# Altium schematic symbol library PWR763A.SCHLIB: 55 symbols (part 1 of 2)
Pins are listed as number, name and electrical type; pins without a type are passive.

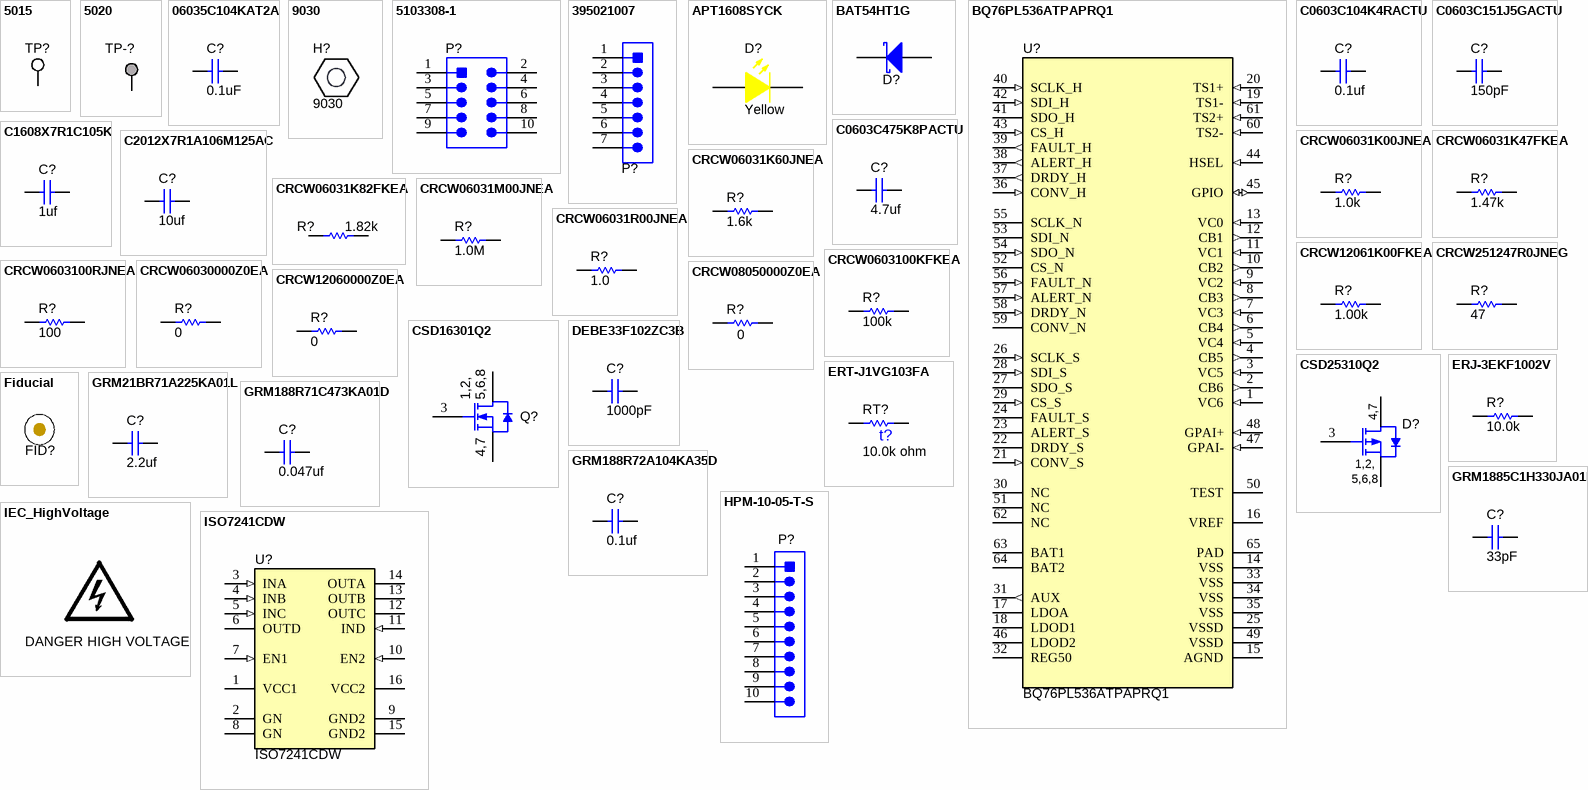
[diagram p0: symbols 5015 to ISO7241CDW]

## 5015
designator TP?  (value not drawn)
Test Point, Miniature, SMT; Manufacturer: Keystone; CompType: Test Point Loop; U/M: EA; SymbolVersion: 2008-07-10; PackageReference: Testpoint_Keystone_Miniature; Publisher: Texas Instruments; LatestRevisionDate: 2015-07-28; PartNumber: 5015; RoHS: Y; MountType: SMT; ComponentLink1Description: Datasheet Link; ComponentLink1URL: http://www.keyelco.com/userAssets/store/files/5015.PDF; Value: SMT; Supplier 1: Digi-Key; Supplier Part Number 1: 36-5015CT-ND
footprint Testpoint_Keystone_Miniature
pins: 1

## 5020
designator TP-?  (value not drawn)  (no BOM)
LOW PROFILE, TH; Manufacturer: Keystone; CompType: Standoff; SymbolVersion: 2010-10-20; PackageReference: LOW PROFILE, TH; Publisher: Texas Instruments; LatestRevisionDate: 2015-08-11; PartNumber: 5020; RoHS: Y; MountType: TH; ComponentLink1Description: Datasheet Link; ComponentLink1URL: http://keyelco.com/userAssets/file/M65p56.pdf; Supplier 1: Digi-Key; Supplier Part Number 1: 36-5020-ND; Supplier 2: Mouser; Supplier Part Number 2: 534-5020; Supplier 3: Farnell; Supplier Part Number 3: 1702264
footprint Keystone_5020
footprint Keystone_5025
footprint Keystone_5015
footprint Testpoint_Keystone_Miniature
pins: 1

## 06035C104KAT2A
designator C?  value 0.1uF  (hidden comment: 06035C104KAT2A)
CAP, CERM, 0.1uf, 50 V, +/- 10%, X7R, 0603; Manufacturer: AVX; Polarized: N; CompType: Capacitor; ValueDisplayed: 0.1µF; U/M: EA; Cap_F: 0.0000001; Tolerance_%: 10; Value1: Unknown; VDC_V: 50; Value2: 50V; TaMin_C: -55; TaMax_C: 125; Cap_Case: 0603; SymbolVersion: 2008-07-09; PartNumber: 06035C104KAT2A; PackageReference: 0603; RoHS: Y; MountType: SMT; Technology: Ceramic; TempCo: X7R; Published: 2008-06-19; Publisher: Texas Instruments; LatestRevisionDate: 2015-07-09; ComponentLink1Description: Datasheet link; ComponentLink1URL: http://www.avx.com/docs/Catalogs/cx7r.pdf; Supplier 1: Digi-Key; Supplier Part Number 1: 478-5052-1-ND; Supplier 2: Mouser; Supplier Part Number 2: 581-06035C104KAT2A; Supplier 3: Farnell; Supplier Part Number 3: 1301804
signal-integrity model Cap
simulation model Cap
footprint 0603
footprint 0603M
footprint 0603L
footprint 0603_HV
footprint 0603S
pins: 1, 2

## 9030
designator H?
BRD SPT SNAP LOCK SCREW MNT 3/8"; Manufacturer: Keystone; SymbolCreator: a0412235; CompType: Nylon Spacer; SymbolVersion: 2013-06-24; PartNumber: 9030; RoHS: Y; PackageReference: BRD SPT SNAP LOCK SCREW MNT 3/8"; MountType: TH; ComponentLink1Description: Datasheet Link; ComponentLink1URL: http://www.keyelco.com/userAssets/file/M60-2p77.pdf; Publisher: Texas Instruments; LatestRevisionDate: 2015-08-11; Supplier 1: Digi-Key; Supplier Part Number 1: 36-9030-ND; Supplier 2: Mouser; Supplier Part Number 2: 534-9030
footprint Keystone_9030

## 5103308-1
designator P?  (value not drawn)
Header (shrouded), 100mil, 5x2, Gold, TH; Manufacturer: TE Connectivity; SymbolCreator: a0412235; U/M: EA; SymbolVersion: 2013-12-22; PartNumber: 5103308-1; PackageReference: 5x2 Shrouded header; CompType: Header; RoHS: Y; MountType: TH; ComponentLink1Description: Datasheet Link; ComponentLink1URL: http://www.te.com/commerce/DocumentDelivery/DDEController?Action=showdoc&DocId=Customer+Drawing%7F5103308%7FE%7Fpdf%7FEnglish%7FENG_CD_5103308_E.pdf%7F5103308-1; Publisher: Texas Instruments; LatestRevisionDate: 2014-11-19; Supplier 1: Digi-Key; Supplier Part Number 1: A33159-ND; Supplier 2: Mouser; Supplier Part Number 2: 571-5103308-1; Supplier 3: Farnell; Supplier Part Number 3: 1772835
footprint CONN_5103308-1
pins: 1, 2, 3, 4, 5, 6, 7, 8, 9, 10

## 395021007
designator P?  (value not drawn)
Header(Shrouded), 3.5mm, 7x1,  R/A, TH; Manufacturer: Molex; SymbolCreator: a0411947; U/M: EA; SymbolVersion: 2013-12-22; PartNumber: 395021007; PackageReference: Header(Shrouded), 3.5mm, 7x1, R/A, TH; CompType: Header; RoHS: Y; MountType: TH; ComponentLink1Description: Datasheet Link; ComponentLink1URL: http://www.molex.com/pdm_docs/sd/395021002_sd.pdf; Publisher: Texas Instruments; LatestRevisionDate: 2015-06-30; Supplier 1: Digi-Key; Supplier Part Number 1: WM7775-ND; Supplier 2: Mouser; Supplier Part Number 2: 538-39502-1007
footprint Molex_395021007
pins: 1, 2, 3, 4, 5, 6, 7

## APT1608SYCK
designator D?  value Yellow  (hidden comment: APT1608SYCK)
LED, Yellow, SMD; Manufacturer: Kingbright; SymbolCreator: Altium; Vf_V: 2.5; Value2: 2.5V; Io_A: 0.02; Vr_V: 5; Ir_A: 1e-005; Tjmax_C: 85; Value1: W; Angle: 120; U/M: EA; SymbolVersion: 2015-06-04; PartNumber: APT1608SYCK; PackageReference: 0603(1608); RoHS: Y; CompType: LED; Type: ?; MountType: SMT; Color: yellow; Published: 2008-07-11; Publisher: Texas Instruments; ComponentLink1URL: http://www.kingbrightusa.com/images/catalog/SPEC/APT1608SYCK.pdf; ComponentLink1Description: Datasheet link; LatestRevisionDate: 2015-06-25; Supplier 1: Digi-Key; Supplier Part Number 1: 754-1124-1-ND; Supplier 2: Mouser; Supplier Part Number 2: 604-APT1608SYCK
footprint APT1608_Yellow
pins: 1 A, 2 K

## BAT54HT1G
designator D?  (value not drawn)
Diode, Schottky, 30 V, 0.2 A, SOD-323; Manufacturer: ON Semiconductor; U/M: EA; Vf_V: 0.35; Value: 30V; Value1: 0.2A; Value2: 0.35V; Io_A: 0.2; Vr_V: 30; CompType: Diode; SymbolVersion: 2008-12-08; PartNumber: BAT54HT1G; PackageReference: SOD-323; MountType: SMT; Type: Schottky; Published: 2008-06-26; Publisher: Texas Instruments; LatestRevisionDate: 2015-07-08; ComponentLink1Description: Datasheet link; ComponentLink1URL: http://www.onsemi.com/pub/Collateral/BAT54HT1-D.PDF; Supplier 1: Digi-Key; Supplier Part Number 1: BAT54HT1OSCT-ND; Supplier 2: Mouser; Supplier Part Number 2: 863-BAT54HT1G; Supplier 3: Farnell; Supplier Part Number 3: 1459033
signal-integrity model Diode
footprint sod-323
pins: 1 K, 2 A

## BQ76PL536ATPAPRQ1
designator U?
3 to 6 Series Cell Lithium-Ion Battery Monitor and Secondary Protection IC for EV and HEV Application, PAP0064F; Alternate PartNumber: BQ76PL536ATPAPTQ1; Manufacturer: Texas Instruments; SymbolCreator: Altium; U/M: EA; SymbolVersion: 2015-11-04; PartNumber: BQ76PL536ATPAPRQ1; PackageReference: PAP0064F; MountType: SMT; ComponentLink1Description: Datasheet Link; ComponentLink1URL: http://www.ti.com/lit/ds/symlink/bq76pl536a.pdf; CompType: IC; RoHS: Y; Publisher: Texas Instruments; LatestRevisionDate: 2015-11-04; Alternate Manufacturer: Texas Instruments
footprint PAP0064F_N
footprint PAP0064F_M
footprint PAP0064F_L
pins: 1 VC6 (in), 2 CB6 (out), 3 VC5 (in), 4 CB5 (out), 5 VC4 (in), 6 CB4 (out), 7 VC3 (in), 8 CB3 (out), 9 VC2 (in), 10 CB2 (out), 11 VC1 (in), 12 CB1 (out), 13 VC0 (in), 14 VSS (power), 15 AGND (power), 16 VREF, 17 LDOA (power), 18 LDOD1 (power), 19 TS1- (in), 20 TS1+ (in), 21 CONV_S (in), 22 DRDY_S (oc), 23 ALERT_S (oc), 24 FAULT_S (oc), 25 VSSD (power), 26 SCLK_S (in), 27 SDO_S (oc), 28 SDI_S (in), 29 CS_S (in), 30 NC, 31 AUX (out), 32 REG50 (power), 33 VSS (power), 34 VSS (power), 35 VSS (power), 36 CONV_H (in), 37 DRDY_H (out), 38 ALERT_H (out), 39 FAULT_H (out), 40 SCLK_H (in), 41 SDO_H (hiz), 42 SDI_H (in), 43 CS_H (in), 44 HSEL (in), 45 GPIO (io), 46 LDOD2 (power), 47 GPAI- (in), 48 GPAI+ (in), 49 VSSD (power), 50 TEST, 51 NC, 52 CS_N (oc), 53 SDI_N (oc), 54 SDO_N (in), 55 SCLK_N (oc), 56 FAULT_N (in), 57 ALERT_N (in), 58 DRDY_N (in), 59 CONV_N (oc), 60 TS2- (in), 61 TS2+ (in), 62 NC, 63 BAT1 (power), 64 BAT2 (power), 65 PAD (power)

## C0603C104K4RACTU
designator C?  ValueDisplayed: 0.1uf  (hidden comment: C0603C104K4RACTU)
CAP, CERM, 0.1uf, 16 V, +/- 10%, X7R, 0603; Manufacturer: Kemet; Polarized: N; CompType: Capacitor; U/M: EA; Cap_F: 0.0000001; Tolerance_%: 10; Value1: Unknown; VDC_V: 16; Value2: 16V; TaMin_C: -55; TaMax_C: 125; Cap_Case: 0603; SymbolVersion: 2008-07-09; Value: 0.1uF; PartNumber: C0603C104K4RACTU; PackageReference: 0603; RoHS: Y; MountType: SMT; Technology: Ceramic; TempCo: X7R; Published: 2008-06-19; Publisher: Texas Instruments; LatestRevisionDate: 2015-07-09; ComponentLink1Description: Datasheet link; ComponentLink1URL: http://www.kemet.com/kemet/web/homepage/kechome.nsf/vapubfiles/F3102_Y5V.pdf/$file/F3102_Y5V.pdf; Supplier 1: Digi-Key; Supplier Part Number 1: 399-1096-1-ND; Supplier 2: Mouser; Supplier Part Number 2: 80-C0603C104K4R; Supplier 3: Farnell; Supplier Part Number 3: 1414610
signal-integrity model Cap
simulation model Cap
footprint 0603
footprint 0603M
footprint 0603L
footprint 0603_HV
footprint 0603S
pins: 1, 2

## C0603C151J5GACTU
designator C?  ValueDisplayed: 150pF  (hidden comment: C0603C151J5GACTU)
CAP, CERM, 150 pF, 50 V, +/- 5%, C0G/NP0, 0603; Manufacturer: Kemet; Polarized: N; CompType: Capacitor; Value: 150pF; U/M: EA; Cap_F: 0.00000000015; Tolerance_%: 5; Value1: Unknown; VDC_V: 50; Value2: 50V; TaMin_C: -55; TaMax_C: 125; Cap_Case: 0603; SymbolVersion: 2008-07-09; PartNumber: C0603C151J5GACTU; PackageReference: 0603; RoHS: Y; MountType: SMT; Technology: Ceramic; TempCo: C0G/NP0; Published: 2008-06-19; Publisher: Texas Instruments; LatestRevisionDate: 2015-07-09; ComponentLink1Description: Datasheet link; ComponentLink1URL: http://www.kemet.com/kemet/web/homepage/kechome.nsf/vapubfiles/F3102_Y5V.pdf/$file/F3102_Y5V.pdf; Supplier 1: Digi-Key; Supplier Part Number 1: 399-1063-1-ND; Supplier 2: Mouser; Supplier Part Number 2: 80-C0603C151J5G; Supplier 3: Farnell; Supplier Part Number 3: 1414615
signal-integrity model Cap
simulation model Cap
footprint 0603
footprint 0603M
footprint 0603L
footprint 0603_HV
footprint 0603S
pins: 1, 2

## C0603C475K8PACTU
designator C?  ValueDisplayed: 4.7uf  (hidden comment: C0603C475K8PACTU)
CAP, CERM, 4.7uf, 10 V, +/- 10%, X5R, 0603; Manufacturer: Kemet; Polarized: N; CompType: Capacitor; U/M: EA; Cap_F: 0.0000047; Tolerance_%: 10; ESR_ohm: 0.006; Value1: 0.006 ohm; Value2: 10V; IRMS_A: 7.24; TaMin_C: -55; TaMax_C: 85; Cap_Case: 0603; SymbolVersion: 2008-07-09; Value: 4.7uF; PartNumber: C0603C475K8PACTU; PackageReference: 0603; RoHS: Y; VDC_V: 10; MountType: SMT; Technology: Ceramic; TempCo: X5R; Published: 2008-06-19; Publisher: Texas Instruments; LatestRevisionDate: 2015-07-09; ComponentLink1Description: Datasheet link; ComponentLink1URL: http://www.kemet.com/kemet/web/homepage/kechome.nsf/vapubfiles/F3102_Y5V.pdf/$file/F3102_Y5V.pdf; Supplier 1: Digi-Key; Supplier Part Number 1: 399-5503-1-ND; Supplier 2: Mouser; Supplier Part Number 2: 80-C0603C475K8P; Supplier 3: Farnell; Supplier Part Number 3: 1572625
signal-integrity model Cap
simulation model Cap
footprint 0603
footprint 0603M
footprint 0603L
footprint 0603_HV
footprint 0603S
pins: 1, 2

## C1608X7R1C105K
designator C?  ValueDisplayed: 1uf  (hidden comment: C1608X7R1C105K)
CAP, CERM, 1uf, 16 V, +/- 10%, X7R, 0603; Manufacturer: TDK; Polarized: N; CompType: Capacitor; U/M: EA; Cap_F: 0.000001; Tolerance_%: 10; ESR_ohm: 0.0057; Value1: 0.0057 ohm; VDC_V: 16; Value2: 16V; TaMin_C: -55; TaMax_C: 125; Cap_Case: 0603; SymbolVersion: 2008-07-09; Value: 1uF; PartNumber: C1608X7R1C105K; PackageReference: 0603; RoHS: Y; MountType: SMT; Technology: Ceramic; TempCo: X7R; Published: 2008-06-19; Publisher: Texas Instruments; LatestRevisionDate: 2015-07-09; ComponentLink1Description: Datasheet link; ComponentLink1URL: http://www.tdk.co.jp/tefe02/e412_c.pdf; Supplier 1: Digi-Key; Supplier Part Number 1: 445-1604-1-ND; Supplier 2: Farnell; Supplier Part Number 2: 1907343
signal-integrity model Cap
simulation model Cap
footprint 0603
footprint 0603M
footprint 0603L
footprint 0603_HV
footprint 0603S
pins: 1, 2

## C2012X7R1A106M125AC
designator C?  ValueDisplayed: 10uf  (hidden comment: C2012X7R1A106M125AC)
CAP, CERM, 10uf, 10 V, +/- 20%, X7R, 0805; Manufacturer: TDK; Polarized: N; CompType: Capacitor; U/M: EA; Cap_F: 0.00001; Tolerance_%: 20; Value1: Unknown; VDC_V: 10; Value2: 10V; TaMin_C: -55; TaMax_C: 125; Cap_Case: 0805; SymbolVersion: 2008-07-09; Value: 10uF; PartNumber: C2012X7R1A106M125AC; PackageReference: 0805; RoHS: Y; MountType: SMT; Technology: Ceramic; TempCo: X7R; Published: 2008-06-19; Publisher: Texas Instruments; LatestRevisionDate: 2015-07-09; ComponentLink1Description: Datasheet link; ComponentLink1URL: http://product.tdk.com/capacitor/mlcc/en/documents/mlcc_commercial_general_en.pdf; Supplier 1: Digi-Key; Supplier Part Number 1: 445-7592-1-ND; Supplier 2: Mouser; Supplier Part Number 2: 810-C2012X7R1A106M; Supplier 3: Farnell; Supplier Part Number 3: 2354122
signal-integrity model Cap
simulation model Cap
footprint 0805_145
footprint 0805_145M
footprint 0805_145L
footprint 0805_145HV
pins: 1, 2

## CRCW06031K00JNEA
designator R?  ValueDisplayed: 1.0k  (hidden comment: CRCW06031K00JNEA)
RES, 1.0 k, 5%, 0.1 W, 0603; Manufacturer: Vishay-Dale; CompType: Resistor; Value: 1.0k; Res_ohm: 1000; Value_Code: 1k00; Tolerance_%: 5; Power_W: 0.1; Value2: 0.1W; VDC_V: 75; TempCo: 200 ppm/C; EIA_Code: E24; U/M: EA; SymbolVersion: 2009-05-29; PartNumber: CRCW06031K00JNEA; PackageReference: 0603; RoHS: Y; Value1: 5%; MountType: SMT; Technology: Thick Film; Published: 2008-06-26; Publisher: Texas Instruments; LatestRevisionDate: 2015-06-13; ComponentLink1Description: Datasheet link; ComponentLink1URL: http://www.vishay.com/docs/20035/dcrcwe3.pdf; Supplier 1: Digi-Key; Supplier Part Number 1: 541-1.0KGCT-ND; Supplier 2: Mouser; Supplier Part Number 2: 71-CRCW0603J-1.0K-E3; Supplier 3: Farnell; Supplier Part Number 3: 1652851
signal-integrity model Resistor
simulation model Resistor
footprint 0603
footprint 0603M
footprint 0603L
footprint 0603_HV
footprint 0603S
pins: 1, 2

## CRCW06031K47FKEA
designator R?  ValueDisplayed: 1.47k  (hidden comment: CRCW06031K47FKEA)
RES, 1.47 k, 1%, 0.1 W, 0603; Manufacturer: Vishay-Dale; CompType: Resistor; Value: 1.47k; Res_ohm: 1470; Value_Code: 1k47; Tolerance_%: 1; Power_W: 0.1; Value2: 0.1W; VDC_V: 75; TempCo: 100 ppm/C; EIA_Code: E96; U/M: EA; SymbolVersion: 2009-05-29; PartNumber: CRCW06031K47FKEA; PackageReference: 0603; RoHS: Y; Value1: 1%; MountType: SMT; Technology: Thick Film; Published: 2008-06-26; Publisher: Texas Instruments; LatestRevisionDate: 2015-06-13; ComponentLink1Description: Datasheet link; ComponentLink1URL: http://www.vishay.com/docs/20035/dcrcwe3.pdf; Supplier 1: Digi-Key; Supplier Part Number 1: 541-1.47KHCT-ND; Supplier 2: Mouser; Supplier Part Number 2: 71-CRCW0603-1.47K-E3; Supplier 3: Farnell; Supplier Part Number 3: 1563607
signal-integrity model Resistor
simulation model Resistor
footprint 0603
footprint 0603M
footprint 0603L
footprint 0603_HV
footprint 0603S
pins: 1, 2

## CRCW06031K60JNEA
designator R?  ValueDisplayed: 1.6k  (hidden comment: CRCW06031K60JNEA)
RES, 1.6 k, 5%, 0.1 W, 0603; Manufacturer: Vishay-Dale; CompType: Resistor; Value: 1.6k; Res_ohm: 1600; Value_Code: 1k60; Tolerance_%: 5; Power_W: 0.1; Value2: 0.1W; VDC_V: 75; TempCo: 200 ppm/C; EIA_Code: E24; U/M: EA; SymbolVersion: 2009-05-29; PartNumber: CRCW06031K60JNEA; PackageReference: 0603; RoHS: Y; Value1: 5%; MountType: SMT; Technology: Thick Film; Published: 2008-06-26; Publisher: Texas Instruments; LatestRevisionDate: 2015-06-13; ComponentLink1Description: Datasheet link; ComponentLink1URL: http://www.vishay.com/docs/20035/dcrcwe3.pdf; Supplier 1: Digi-Key; Supplier Part Number 1: 541-1.6KGCT-ND; Supplier 2: Mouser; Supplier Part Number 2: 71-CRCW0603J-1.6K-E3; Supplier 3: Farnell; Supplier Part Number 3: 1541949
signal-integrity model Resistor
simulation model Resistor
footprint 0603
footprint 0603M
footprint 0603L
footprint 0603_HV
footprint 0603S
pins: 1, 2

## CRCW06031K82FKEA
designator R?  ValueDisplayed: 1.82k  (hidden comment: CRCW06031K82FKEA)
RES, 1.82 k, 1%, 0.1 W, 0603; Manufacturer: Vishay-Dale; CompType: Resistor; Value: 1.82k; Res_ohm: 1820; Value_Code: 1k82; Tolerance_%: 1; Power_W: 0.1; Value2: 0.1W; VDC_V: 75; TempCo: 100 ppm/C; EIA_Code: E96; U/M: EA; SymbolVersion: 2009-05-29; PartNumber: CRCW06031K82FKEA; PackageReference: 0603; RoHS: Y; Value1: 1%; MountType: SMT; Technology: Thick Film; Published: 2008-06-26; Publisher: Texas Instruments; LatestRevisionDate: 2015-06-13; ComponentLink1Description: Datasheet link; ComponentLink1URL: http://www.vishay.com/docs/20035/dcrcwe3.pdf; Supplier 1: Digi-Key; Supplier Part Number 1: 541-1.82KHCT-ND; Supplier 2: Mouser; Supplier Part Number 2: 71-CRCW0603-1.82K-E3; Supplier 3: Farnell; Supplier Part Number 3: 1652855
signal-integrity model Resistor
simulation model Resistor
footprint 0603
footprint 0603M
footprint 0603L
footprint 0603_HV
footprint 0603S
pins: 1, 2

## CRCW06031M00JNEA
designator R?  ValueDisplayed: 1.0M  (hidden comment: CRCW06031M00JNEA)
RES, 1.0 M, 5%, 0.1 W, 0603; Manufacturer: Vishay-Dale; CompType: Resistor; Value: 1.0Meg; Res_ohm: 1000000; Value_Code: 1M00; Tolerance_%: 5; Power_W: 0.1; Value2: 0.1W; VDC_V: 75; TempCo: 200 ppm/C; EIA_Code: E24; U/M: EA; SymbolVersion: 2009-05-29; PartNumber: CRCW06031M00JNEA; PackageReference: 0603; RoHS: Y; Value1: 5%; MountType: SMT; Technology: Thick Film; Published: 2008-06-26; Publisher: Texas Instruments; LatestRevisionDate: 2015-06-13; ComponentLink1Description: Datasheet link; ComponentLink1URL: http://www.vishay.com/docs/20035/dcrcwe3.pdf; Supplier 1: Digi-Key; Supplier Part Number 1: 541-1.0MGCT-ND; Supplier 2: Mouser; Supplier Part Number 2: 71-CRCW0603J-1.0M-E3; Supplier 3: Farnell; Supplier Part Number 3: 1514706
signal-integrity model Resistor
simulation model Resistor
footprint 0603
footprint 0603M
footprint 0603L
footprint 0603_HV
footprint 0603S
pins: 1, 2

## CRCW06031R00JNEA
designator R?  ValueDisplayed: 1.0  (hidden comment: CRCW06031R00JNEA)
RES, 1.0, 5%, 0.1 W, 0603; Manufacturer: Vishay-Dale; CompType: Resistor; Value: 1.0; Res_ohm: 1; Value_Code: 1R00; Tolerance_%: 5; Power_W: 0.1; Value2: 0.1W; VDC_V: 75; TempCo: 200 ppm/C; EIA_Code: E24; U/M: EA; SymbolVersion: 2009-05-29; PartNumber: CRCW06031R00JNEA; PackageReference: 0603; RoHS: Y; Value1: 5%; MountType: SMT; Technology: Thick Film; Published: 2008-06-26; Publisher: Texas Instruments; LatestRevisionDate: 2015-06-13; ComponentLink1Description: Datasheet link; ComponentLink1URL: http://www.vishay.com/docs/20035/dcrcwe3.pdf; Supplier 1: Digi-Key; Supplier Part Number 1: 541-1.0GCT-ND; Supplier 2: Mouser; Supplier Part Number 2: 71-CRCW0603J-1-E3; Supplier 3: Farnell; Supplier Part Number 3: 1514709
signal-integrity model Resistor
simulation model Resistor
footprint 0603
footprint 0603M
footprint 0603L
footprint 0603_HV
footprint 0603S
pins: 1, 2

## CRCW12061K00FKEA
designator R?  value 1.00k  (hidden comment: CRCW12061K00FKEA)
RES, 1.00 k, 1%, 0.25 W, 1206; Manufacturer: Vishay-Dale; CompType: Resistor; Res_ohm: 1000; Value_Code: 1k00; Tolerance_%: 1; Power_W: 0.25; Value2: 0.25W; VDC_V: 200; TempCo: 100 ppm/C; EIA_Code: E96; U/M: EA; SymbolVersion: 2009-05-29; PartNumber: CRCW12061K00FKEA; PackageReference: 1206; RoHS: Y; Value1: 1%; MountType: SMT; Technology: Thick Film; Published: 2008-06-26; Publisher: Texas Instruments; LatestRevisionDate: 2015-06-11; ComponentLink1Description: Datasheet link; ComponentLink1URL: http://www.vishay.com/docs/20035/dcrcwe3.pdf; Supplier 1: Digi-Key; Supplier Part Number 1: 541-1.00KFCT-ND; Supplier 2: Mouser; Supplier Part Number 2: 71-CRCW1206-1.0K-E3; Supplier 3: Farnell; Supplier Part Number 3: 1469965; ValueDisplayed: 1.00k
signal-integrity model Resistor
simulation model Resistor
footprint 1206
footprint 1206M
footprint 1206L
pins: 1, 2

## CRCW251247R0JNEG
designator R?  ValueDisplayed: 47  (hidden comment: CRCW251247R0JNEG)
RES, 47, 5%, 1 W, 2512; Manufacturer: Vishay-Dale; CompType: Resistor; Value: 47; Value_Code: 47R0; Tolerance_%: 5; Power_W: 1; Value2: 1W; VDC_V: 500; TempCo: 200 ppm/C; EIA_Code: E24; U/M: EA; SymbolVersion: 2009-05-29; PartNumber: CRCW251247R0JNEG; PackageReference: 2512; RoHS: Y; Res_ohm: 47; Value1: 5%; MountType: SMT; Technology: Thick Film; Published: 2008-06-26; Publisher: Texas Instruments; LatestRevisionDate: 2015-04-21; ComponentLink1Description: Datasheet link; ComponentLink1URL: http://www.vishay.com/doc?20035; Supplier 1: Digi-Key; Supplier Part Number 1: 541-47XCT-ND
signal-integrity model Resistor
simulation model Resistor
footprint 2512
footprint 2512M
footprint 2512L
footprint R2512
pins: 1, 2

## CRCW0603100KFKEA
designator R?  ValueDisplayed: 100k  (hidden comment: CRCW0603100KFKEA)
RES, 100 k, 1%, 0.1 W, 0603; Manufacturer: Vishay-Dale; CompType: Resistor; Value: 100k; Res_ohm: 100000; Tolerance_%: 1; Power_W: 0.1; Value2: 0.1W; VDC_V: 75; TempCo: 100 ppm/C; EIA_Code: E96; U/M: EA; SymbolVersion: 2009-05-29; PartNumber: CRCW0603100KFKEA; PackageReference: 0603; RoHS: Y; Value_Code: 100k; Value1: 1%; MountType: SMT; Technology: Thick Film; Published: 2008-06-26; Publisher: Texas Instruments; LatestRevisionDate: 2015-06-13; ComponentLink1Description: Datasheet link; ComponentLink1URL: http://www.vishay.com/docs/20035/dcrcwe3.pdf; Supplier 1: Digi-Key; Supplier Part Number 1: 541-100KHCT-ND; Supplier 2: Mouser; Supplier Part Number 2: 71-CRCW0603-100K-E3; Supplier 3: Farnell; Supplier Part Number 3: 1469649
signal-integrity model Resistor
simulation model Resistor
footprint 0603
footprint 0603M
footprint 0603L
footprint 0603_HV
footprint 0603S
pins: 1, 2

## CRCW0603100RJNEA
designator R?  ValueDisplayed: 100  (hidden comment: CRCW0603100RJNEA)
RES, 100, 5%, 0.1 W, 0603; Manufacturer: Vishay-Dale; CompType: Resistor; Value: 100; Value_Code: 100R; Tolerance_%: 5; Power_W: 0.1; Value2: 0.1W; VDC_V: 75; TempCo: 200 ppm/C; EIA_Code: E24; U/M: EA; SymbolVersion: 2009-05-29; PartNumber: CRCW0603100RJNEA; PackageReference: 0603; RoHS: Y; Res_ohm: 100; Value1: 5%; MountType: SMT; Technology: Thick Film; Published: 2008-06-26; Publisher: Texas Instruments; LatestRevisionDate: 2015-06-13; ComponentLink1Description: Datasheet link; ComponentLink1URL: http://www.vishay.com/docs/20035/dcrcwe3.pdf; Supplier 1: Digi-Key; Supplier Part Number 1: 541-100GCT-ND; Supplier 2: Mouser; Supplier Part Number 2: 71-CRCW0603J-100-E3; Supplier 3: Farnell; Supplier Part Number 3: 1514715
signal-integrity model Resistor
simulation model Resistor
footprint 0603
footprint 0603M
footprint 0603L
footprint 0603_HV
footprint 0603S
pins: 1, 2

## CRCW06030000Z0EA
designator R?  ValueDisplayed: 0  (hidden comment: CRCW06030000Z0EA)
RES, 0, 5%, 0.1 W, 0603; Manufacturer: Vishay-Dale; CompType: Resistor; Value: 0; Value_Code: 0000; Tolerance_%: 5; Power_W: 0.1; Value2: 0.1W; VDC_V: 75; TempCo: 200 ppm/C; EIA_Code: E24; U/M: EA; SymbolVersion: 2009-05-29; PartNumber: CRCW06030000Z0EA; PackageReference: 0603; RoHS: Y; Res_ohm: 0; Value1: 5%; MountType: SMT; Technology: Thick Film; Published: 2008-06-26; Publisher: Texas Instruments; LatestRevisionDate: 2015-06-13; ComponentLink1Description: Datasheet link; ComponentLink1URL: http://www.vishay.com/docs/20035/dcrcwe3.pdf; Supplier 1: Digi-Key; Supplier Part Number 1: 541-0.0GCT-ND; Supplier 2: Mouser; Supplier Part Number 2: 71-CRCW0603-0-E3; Supplier 3: Farnell; Supplier Part Number 3: 1469739
signal-integrity model Resistor
simulation model Resistor
footprint 0603
footprint 0603M
footprint 0603L
footprint 0603_HV
footprint 0603S
pins: 1, 2

## CRCW08050000Z0EA
designator R?  ValueDisplayed: 0  (hidden comment: CRCW08050000Z0EA)
RES, 0, 5%, 0.125 W, 0805; Manufacturer: Vishay-Dale; CompType: Resistor; Value: 0; Value_Code: 0000; Tolerance_%: 5; Power_W: 0.125; Value2: 0.125W; VDC_V: 150; TempCo: 200 ppm/C; EIA_Code: E24; U/M: EA; SymbolVersion: 2009-05-29; PartNumber: CRCW08050000Z0EA; PackageReference: 0805; RoHS: Y; Res_ohm: 0; Value1: 5%; MountType: SMT; Technology: Thick Film; Published: 2008-06-26; Publisher: Texas Instruments; LatestRevisionDate: 2015-07-07; ComponentLink1Description: Datasheet link; ComponentLink1URL: http://www.vishay.com/docs/20035/dcrcwe3.pdf; Supplier 1: Digi-Key; Supplier Part Number 1: 541-0.0ACT-ND; Supplier 2: Mouser; Supplier Part Number 2: 71-CRCW0805-0-E3; Supplier 3: Farnell; Supplier Part Number 3: 1469846
signal-integrity model Resistor
simulation model Resistor
footprint 0805_HV
footprint 0805_HV1
footprint 0805
footprint 0805M
pins: 1, 2

## CRCW12060000Z0EA
designator R?  ValueDisplayed: 0  (hidden comment: CRCW12060000Z0EA)
RES, 0, 5%, 0.25 W, 1206; Manufacturer: Vishay-Dale; CompType: Resistor; Value: 0; Value_Code: 0000; Tolerance_%: 5; Power_W: 0.25; Value2: 0.25W; VDC_V: 200; TempCo: 200 ppm/C; EIA_Code: E24; U/M: EA; SymbolVersion: 2009-05-29; PartNumber: CRCW12060000Z0EA; PackageReference: 1206; RoHS: Y; Res_ohm: 0; Value1: 5%; MountType: SMT; Technology: Thick Film; Published: 2008-06-26; Publisher: Texas Instruments; LatestRevisionDate: 2015-06-11; ComponentLink1Description: Datasheet link; ComponentLink1URL: http://www.vishay.com/docs/20035/dcrcwe3.pdf; Supplier 1: Digi-Key; Supplier Part Number 1: 541-0.0ECT-ND; Supplier 2: Mouser; Supplier Part Number 2: 71-CRCW1206-0-E3; Supplier 3: Farnell; Supplier Part Number 3: 1469963
signal-integrity model Resistor
simulation model Resistor
footprint 1206
footprint 1206M
footprint 1206L
pins: 1, 2

## CSD16301Q2
designator Q?  (value not drawn)
MOSFET, N-CH, 25 V, 5 A, SON 2x2mm; Manufacturer: Texas Instruments; Alternate Manufacturer: None; U/M: EA; ChType: N; Value: 25V; VdsMax_V: 25; Value1: 0.023 ohm; Rdson45_ohm: 0.023; Value2: 2 nC; QgTyp_nC: 2; Vgs_V: 10; IdsMax_A: 5; SymbolVersion: 2011-11-14; CompType: MOSFET; PartNumber: CSD16301Q2; PackageReference: SON 2x2mm; RoHS: Y; MountType: SMT; Published: 2008-06-19; Publisher: Texas Instruments; LatestRevisionDate: 2015-08-03; LatestRevisionNote: Added parts.; ComponentLink1Description: Datasheet link; ComponentLink1URL: http://www.ti.com/lit/ds/symlink/csd16301q2.pdf; Supplier 1: Digi-Key; Supplier Part Number 1: 296-25260-1-ND; Supplier 2: Mouser; Supplier Part Number 2: 595-CSD16301Q2; Supplier 3: Farnell; Supplier Part Number 3: 1854243
footprint TRANS_NexFET_Q2
simulation model CSD16301Q2A
pins: 1 D, 2 D, 3 G, 4 S, 5 D, 6 D, 7 S, 8 D
text: 1,2,; 5,6,8; 4,7

## CSD25310Q2
designator D?  (value not drawn)
MOSFET, P-CH, -20 V, -20 A, SON 2x2mm; Manufacturer: Texas Instruments; Alternate Manufacturer: None; SymbolCreator: a0411947; U/M: EA; ChType: P; Value: -20V; Value1: 0.0239 ohm; Rdson45_ohm: 0.0239; Value2: 3.6 nC; QgTyp_nC: 3.6; Vgs_V: 8; AEC Category: Q101; SymbolVersion: 2013-04-04; PartNumber: CSD25310Q2; PackageReference: SON 2x2mm; CompType: MOSFET; VdsMax_V: -20; IdsMax_A: -20; RoHS: Y; MountType: SMT; Published: 2008-06-19; Publisher: Texas Instruments; LatestRevisionDate: 2015-08-18; LatestRevisionNote: Added parts.; ComponentLink1Description: Datasheet link; ComponentLink1URL: http://www.ti.com/lit/ds/symlink/csd25310q2.pdf; Supplier 1: Digi-Key; Supplier Part Number 1: CSD25310Q2-ND; Supplier 2: Mouser; Supplier Part Number 2: 595-CSD25310Q2; AEC Qualified: ?
footprint TRANS_NexFET_Q2
pins: 1 S, 2 S, 3 G, 4 D, 5 S, 6 S, 7 D, 8 S
text: 4,7; 1,2,; 5,6,8

## DEBE33F102ZC3B
designator C?  ValueDisplayed: 1000pF  (hidden comment: DEBE33F102ZC3B)
CAP, CERM, 1000 pF, 3150 V, +80/-20%, E, Radial Disc D7x6mm; Manufacturer: MuRata; Polarized: N; CompType: Capacitor; Value: 1000pF; U/M: EA; Cap_F: 0.000000001; Tolerance_%: 80; Value1: Unknown; VDC_V: 3150; Value2: 3150V; TaMin_C: -25; TaMax_C: 85; Cap_Case: Disc, 7x6mm; SymbolVersion: 2008-07-09; PartNumber: DEBE33F102ZC3B; PackageReference: Radial Disc D7x6mm; RoHS: Y; MountType: TH; Technology: Ceramic; TempCo: E; Published: 2008-06-19; Publisher: Texas Instruments; LatestRevisionDate: 2015-07-09; ComponentLink1Description: Datasheet link; ComponentLink1URL: http://www.murata.com/products/catalog/pdf/c85e.pdf; Supplier 1: Digi-Key; Supplier Part Number 1: 490-4247-ND; Supplier 2: Mouser; Supplier Part Number 2: 81-DEBE33F102ZC3B; Supplier 3: Farnell; Supplier Part Number 3: 9527192
signal-integrity model Cap
simulation model Cap
footprint CAPRD750W60D700H1000
pins: 1, 2

## ERJ-3EKF1002V
designator R?  ValueDisplayed: 10.0k  (hidden comment: ERJ-3EKF1002V)
RES, 10.0 k, 1%, 0.1 W, 0603; Manufacturer: Panasonic; CompType: Resistor; Value: 10.0k; Res_ohm: 10000; Value_Code: 10k0; Tolerance_%: 1; Power_W: 0.1; Value2: 0.1W; VDC_V: 75; TempCo: 100 ppm/C; EIA_Code: E96; U/M: EA; SymbolVersion: 2009-05-29; PartNumber: ERJ-3EKF1002V; PackageReference: 0603; RoHS: Y; Value1: 1%; MountType: SMT; Technology: Thick Film; Published: 2008-06-26; Publisher: Texas Instruments; LatestRevisionDate: 2015-06-13; ComponentLink1Description: Datasheet link; ComponentLink1URL: http://industrial.panasonic.com/www-data/pdf/AOA0000/AOA0000CE2.pdf; Supplier 1: Digi-Key; Supplier Part Number 1: P10.0KHCT-ND; Supplier 2: Mouser; Supplier Part Number 2: 667-ERJ-3EKF1002V; Supplier 3: Farnell; Supplier Part Number 3: 2397737
signal-integrity model Resistor
simulation model Resistor
footprint 0603
footprint 0603M
footprint 0603L
footprint 0603_HV
footprint 0603S
pins: 1, 2

## ERT-J1VG103FA
designator RT?  value 10.0k ohm  (hidden comment: ERT-J1VG103FA)
Thermistor NTC, 10.0k ohm, 1%, 0603; Manufacturer: Panasonic; Tolerance_%: 1; Power_W: 0.1; TaMin_C: -40; TaMax_C: 125; U/M: EA; CompType: ThermistorNTC; SymbolVersion: 2008-11-25; PartNumber: ERT-J1VG103FA; Series: ERT-J; PackageReference: 0603; MountType: SMT; RoHS: Y; ComponentLink1Description: Datasheet link; ComponentLink1URL: http://industrial.panasonic.com/www-data/pdf/AUA0000/AUA0000CE1.pdf; Published: 2009-09-22; Publisher: Texas Instruments; LatestRevisionDate: 2015-06-10; Supplier 1: Digi-Key; Supplier Part Number 1: P12011CT-ND
footprint 0603
footprint 0603M
footprint 0603L
footprint 0603_HV
footprint 0603S
pins: 1, 2
text: t?

## Fiducial
designator FID?  (value not drawn)
Fiducial mark.  There is nothing to buy or mount.; SymbolCreator: codlsc; SymbolVersion: 2009-11-4; CompType: Fiducial; Publisher: Texas Instruments; LatestRevisionDate: 2014-08-01; LatestRevisionNote: Added Alternate PartNumber and Alternate Manufacturer parameters to appropriate components.; Manufacturer: N/A; MountType: N/A; PackageReference: Fiducial; PartNumber: N/A; ClassName: FiducialMark
footprint Fiducial10-30
footprint Fiducial10-20
footprint Fiducial15-30
footprint Fiducial20-40
footprint Fiducial6.4-20

## GRM21BR71A225KA01L
designator C?  ValueDisplayed: 2.2uf  (hidden comment: GRM21BR71A225KA01L)
CAP, CERM, 2.2uf, 10 V, +/- 10%, X7R, 0805; Manufacturer: MuRata; Polarized: N; CompType: Capacitor; U/M: EA; Cap_F: 0.0000022; Tolerance_%: 10; ESR_ohm: 0.006; Value1: 0.006 ohm; Value2: 10V; TaMin_C: -55; TaMax_C: 125; Cap_Case: 0805; SymbolVersion: 2008-07-09; Value: 2.2uF; PartNumber: GRM21BR71A225KA01L; PackageReference: 0805; RoHS: Y; VDC_V: 10; MountType: SMT; Technology: Ceramic; TempCo: X7R; Published: 2008-06-19; Publisher: Texas Instruments; LatestRevisionDate: 2015-07-09; ComponentLink1Description: Datasheet link; ComponentLink1URL: http://search.murata.co.jp/Ceramy/PnsearchViewAction.do?HnOFG=ON&HnNFG=ON&SEL_CNT=50&sLang=en&sKey=GRM21BR71A225KA01L&x=9&y=9&search=startwith; Supplier 1: Digi-Key; Supplier Part Number 1: 490-1696-1-ND; Supplier 2: Mouser; Supplier Part Number 2: 81-GRM21BR71A225KA01; Supplier 3: Farnell; Supplier Part Number 3: 1828923
signal-integrity model Cap
simulation model Cap
footprint 0805_HV
footprint 0805_HV1
footprint 0805
footprint 0805M
footprint 0805L
pins: 1, 2

## GRM188R71C473KA01D
designator C?  ValueDisplayed: 0.047uf  (hidden comment: GRM188R71C473KA01D)
CAP, CERM, 0.047uf, 16 V, +/- 10%, X7R, 0603; Manufacturer: MuRata; Polarized: N; CompType: Capacitor; U/M: EA; Cap_F: 0.000000047; Tolerance_%: 10; Value1: Unknown; VDC_V: 16; Value2: 16V; TaMin_C: -55; TaMax_C: 125; Cap_Case: 0603; SymbolVersion: 2008-07-09; Value: 0.047uF; PartNumber: GRM188R71C473KA01D; PackageReference: 0603; RoHS: Y; MountType: SMT; Technology: Ceramic; TempCo: X7R; Published: 2008-06-19; Publisher: Texas Instruments; LatestRevisionDate: 2015-07-09; ComponentLink1Description: Datasheet link; ComponentLink1URL: http://search.murata.co.jp/Ceramy/PnsearchViewAction.do?HnOFG=ON&HnNFG=ON&SEL_CNT=50&sLang=en&sKey=GRM188R71C473KA01D&x=9&y=9&search=startwith; Supplier 1: Digi-Key; Supplier Part Number 1: 490-1529-1-ND; Supplier 2: Mouser; Supplier Part Number 2: 81-GRM39X473K16D
signal-integrity model Cap
simulation model Cap
footprint 0603
footprint 0603M
footprint 0603L
footprint 0603_HV
footprint 0603S
pins: 1, 2

## GRM188R72A104KA35D
designator C?  ValueDisplayed: 0.1uf  (hidden comment: GRM188R72A104KA35D)
CAP, CERM, 0.1uf, 100 V, +/- 10%, X7R, 0603; Manufacturer: MuRata; Polarized: N; CompType: Capacitor; U/M: EA; Cap_F: 0.0000001; Tolerance_%: 10; Value1: Unknown; VDC_V: 100; Value2: 100V; TaMin_C: -55; TaMax_C: 125; Cap_Case: 0603; SymbolVersion: 2008-07-09; Value: 0.1uF; PartNumber: GRM188R72A104KA35D; PackageReference: 0603; RoHS: Y; MountType: SMT; Technology: Ceramic; TempCo: X7R; Published: 2008-06-19; Publisher: Texas Instruments; LatestRevisionDate: 2015-07-09; ComponentLink1Description: Datasheet link; ComponentLink1URL: http://search.murata.co.jp/Ceramy/PnsearchViewAction.do?HnOFG=ON&HnNFG=ON&SEL_CNT=50&sLang=en&sKey=GRM188R72A104KA35D&x=9&y=9&search=startwith; Supplier 1: Digi-Key; Supplier Part Number 1: 490-3285-1-ND; Supplier 2: Mouser; Supplier Part Number 2: 81-GRM188R72A104KA35; Supplier 3: Farnell; Supplier Part Number 3: 1828921
signal-integrity model Cap
simulation model Cap
footprint 0603
footprint 0603M
footprint 0603L
footprint 0603_HV
footprint 0603S
pins: 1, 2

## GRM1885C1H330JA01D
designator C?  ValueDisplayed: 33pF  (hidden comment: GRM1885C1H330JA01D)
CAP, CERM, 33 pF, 50 V, +/- 5%, C0G/NP0, 0603; Manufacturer: MuRata; Polarized: N; CompType: Capacitor; Value: 33pF; U/M: EA; Cap_F: 0.000000000033; Tolerance_%: 5; Value1: Unknown; VDC_V: 50; Value2: 50V; TaMin_C: -55; TaMax_C: 125; Cap_Case: 0603; SymbolVersion: 2008-07-09; PartNumber: GRM1885C1H330JA01D; PackageReference: 0603; RoHS: Y; MountType: SMT; Technology: Ceramic; TempCo: C0G/NP0; Published: 2008-06-19; Publisher: Texas Instruments; LatestRevisionDate: 2015-07-09; ComponentLink1Description: Datasheet link; ComponentLink1URL: http://search.murata.co.jp/Ceramy/PnsearchViewAction.do?HnOFG=ON&HnNFG=ON&SEL_CNT=50&sLang=en&sKey=GRM1885C1H330JA01D&x=9&y=9&search=startwith; Supplier 1: Digi-Key; Supplier Part Number 1: 490-1415-1-ND; Supplier 2: Mouser; Supplier Part Number 2: 81-GRM39C330J50; Supplier 3: Farnell; Supplier Part Number 3: 1828910
signal-integrity model Cap
simulation model Cap
footprint 0603
footprint 0603M
footprint 0603L
footprint 0603_HV
footprint 0603S
pins: 1, 2

## HPM-10-05-T-S
designator P?  (value not drawn)
Header, 5.08mm, 10x1, Tin, TH; Manufacturer: Samtec; SymbolCreator: a0412235; U/M: EA; SymbolVersion: 2013-12-22; PartNumber: HPM-10-05-T-S; PackageReference: Header, 5.08mm, 10x1, TH; ClassName: Header; CompType: Header; RoHS: Y; MountType: TH; ComponentLink1Description: Datasheet Link; ComponentLink1URL: https://www.samtec.com/ftppub/pdf/HPM.PDF; Publisher: Texas Instruments; LatestRevisionDate: 2015-08-24; Supplier 1: Digi-Key; Supplier Part Number 1: HPM-10-05-T-S-ND
footprint Samtec_HPM-10-05-T-S
pins: 1, 2, 3, 4, 5, 6, 7, 8, 9, 10

## IEC_HighVoltage
designator CAUTION ?, comment DANGER HIGH VOLTAGE  (no BOM)
IEC 61010-1 High Voltage Warning; SymbolCreator: a0412235; SymbolVersion: 2011-08-22; Published: 2009-03-03; Publisher: Texas Instruments; LatestRevisionDate: 2014-11-20
footprint IEC_HighVoltage_Large
footprint IEC_HighVoltage_Medium
footprint IEC_HighVoltage_Small

## ISO7241CDW
designator U?
25 Mbps Quad Channels, 3 / 1, Digital Isolator, 3.3 V / 5 V, -40 to +125 degC, 16-pin SOIC (DW), Green (RoHS & no Sb/Br); Manufacturer: Texas Instruments; Alternate PartNumber: Equivalent; Datarate(Mbps): 25; Input Noise Filter: Yes; Insulation Rating(VRMS): 2500; Prop Delay(Max)(ns): 42; Rating: Catalog; Supply Voltage(s)(V): 3.3, 5; TTL/CMOS Input Threshold: TTL; DatasheetVersion: SLLS868N; PackageVersion: 4040000-2/G, 01/2011; PackageReference: DW0016A; PackageDescription: 16-Pin Plastic Small Outline, Body 10.30 x 7.50 mm, Pitch 1.27 mm; Supplier 1: Digi-Key; Supplier Part Number 1: 296-22963-5-ND; Supplier 2: Farnell; Supplier Part Number 2: 2296075; Supplier 3: Newark; Supplier Part Number 3: 73M3155; Supplier 4: Mouser; Supplier Part Number 4: 595-ISO7241CDW; SubFamily: Isolator; Thermal Shutdown: No; MountType: SMT; Code_JEDEC: MS-013; PartNumber: ISO7241CDW; ComponentLink1Description: Manufacturer URL; ComponentLink1URL: http://www.ti.com/; ComponentLink2Description: Datasheet; ComponentLink2URL: http://www.ti.com/general/docs/lit/getliterature.tsp?genericPartNumber=ISO7241C&fileType=pdf; ComponentLink3Description: Package Specification; ComponentLink3URL: http://www.ti.com/litv/pdf/msoi003g; ComponentLink4Description: SamplesURL; ComponentLink4URL: http://www.ti.com/product/iso7241c#samples; Alternate Manufacturer: Texas Instruments
footprint DW0016A_N (SOIC, 16-Leads, Body 10.5x7.6mm, Pitch 1.27mm, IPC Medium Density)
footprint DW0016A_L (SOIC, 16-Leads, Body 10.5x7.6mm, Pitch 1.27mm, IPC High Density)
footprint DW0016A_M (SOIC, 16-Leads, Body 10.5x7.6mm, Pitch 1.27mm, IPC Low Density)
pins: 1 VCC1 (power), 2 GN (power), 3 INA (in), 4 INB (in), 5 INC (in), 6 OUTD (hiz), 7 EN1 (in), 8 GN (power), 9 GND2 (power), 10 EN2 (in), 11 IND (in), 12 OUTC (hiz), 13 OUTB (hiz), 14 OUTA (hiz), 15 GND2 (power), 16 VCC2 (power)

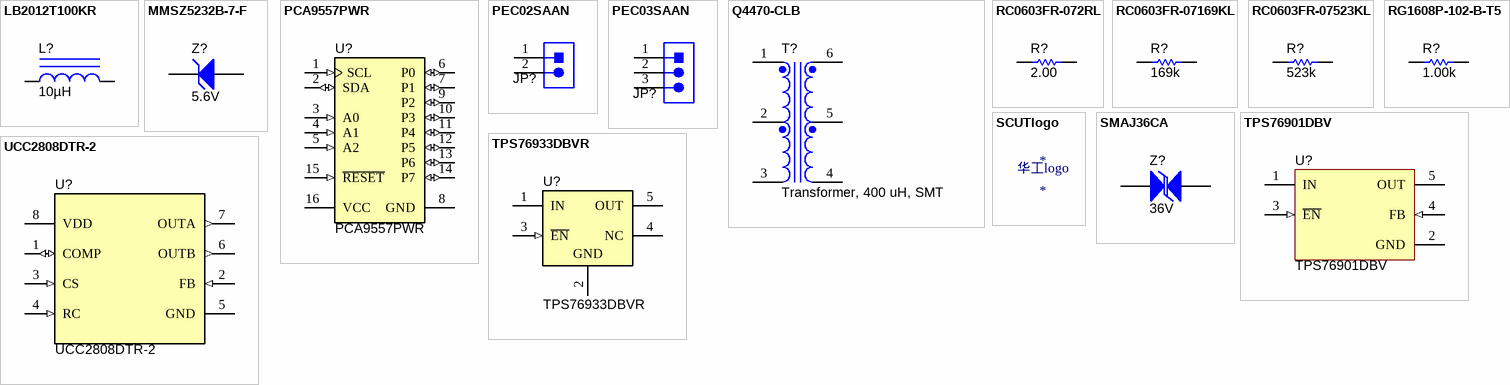
[diagram p1: symbols LB2012T100KR to UCC2808DTR-2]

## LB2012T100KR
designator L?  ValueDisplayed: 10µH  (hidden comment: LB2012T100KR)
Inductor, Wirewound, Ferrite, 10uH, 0.12A, 0.5 ohm, SMD; Manufacturer: Taiyo Yuden; Ind_H: 10.0E-6; Imax_A: 0.12; Irms: 0.12A @ C rise; Isat: 0.12A @ % inductance drop; DCR_ohm: 0.5; Value1: 0.5 ohm; U/M: EA; SymbolVersion: 2008-07-23; CompType: Inductor; Value: 10uH; PartNumber: LB2012T100KR; PackageReference: 0805; Value2: 0.12A; Technology: Wirewound; MountType: SMT; Material: Ferrite; Published: 2008-06-26; Publisher: Texas Instruments; LatestRevisionDate: 2013-10-24; ComponentLink1Description: Datasheet link; ComponentLink1URL: http://www.yuden.co.jp/ut/product/category/inductor/LB2012T100KR.pdf; RoHS: Y; Supplier 1: Digi-Key; Supplier Part Number 1: 587-2487-1-ND; Supplier 2: Mouser; Supplier Part Number 2: 963-LB2012T100KR; Supplier 3: Farnell; Supplier Part Number 3: 1463501
signal-integrity model Inductor
simulation model Inductor
footprint 0805_HV
footprint 0805
footprint 0805M
footprint 0805L
pins: 1, 2

## MMSZ5232B-7-F
designator Z?  value 5.6V  (hidden comment: MMSZ5232B-7-F)
Diode, Zener, 5.6 V, 500 mW, SOD-123; Manufacturer: Diodes Inc.; SymbolCreator: a0412235; U/M: EA; Power_W: 0.5; Vz_V: 5.6; Value1: 0.5W; RJA_CperW: 350; AEC Category: Q101; SymbolVersion: 2010-08-25; PartNumber: MMSZ5232B-7-F; PackageReference: SOD-123; CompType: Zener; Vr_V: N/A; MountType: SMT; RoHS: Y; ComponentLink1Description: Datasheet link; ComponentLink1URL: http://www.diodes.com/datasheets/ds18010.pdf; Published: 2008-10-08; Publisher: Texas Instruments; LatestRevisionDate: 2015-08-17; LatestRevisionNote: Updated Supplier Data; Supplier 1: Digi-Key; Supplier Part Number 1: MMSZ5232B-FDICT-ND; Supplier 2: Mouser; Supplier Part Number 2: 621-MMSZ5232B-F; Supplier 3: Farnell; Supplier Part Number 3: 2061469; AEC Qualified: ?
signal-integrity model Diode
footprint SOD-123
pins: 1 K, 2 A

## PCA9557PWR
designator U?
Remote 8-Bit I2C and SMBus Low-Power I/O Expander with Reset and Configuration Registers, 2.3 to 5.5 V, -40 to 85 degC, 16-pin TSSOP (PW), Green (RoHS & no Sb/Br); Manufacturer: Texas Instruments; Alternate PartNumber: Equivalent; SubFamily: I2C IO Expander; No. of Outputs: 8; Reset Input: Yes; fSCLK(Max)(MHz): 400; VCC(Min)(V): 2.3; VCC(Max)(V): 5.5; I2C Address: 0011 xxx; DatasheetVersion: SCPS133I; PackageVersion: revG, Feb-2011; PackageReference: PW0016A; PackageDescription: 16-Pin Plastic Thin Small Outline Package 5 x 4.4 mm Body ,0.65 mm Pitch; Supplier 1: Digi-Key; Supplier Part Number 1: 296-20978-2-ND; Supplier 2: Digi-Key; Supplier Part Number 2: 296-20978-1-ND; Supplier 3: Digi-Key; Supplier Part Number 3: 296-20978-6-ND; Supplier 4: Newark; Supplier Part Number 4: 80K2703; Supplier 5: Mouser; Supplier Part Number 5: 595-PCA9557PWR; Eco-Plan: Green (RoHS & no Sb/Br); Technology Family: I2C; Max Frequency(kHz): 400; # of I/Os: 8; Vcc range(V): 2.3 to 5.5; Low Power: Yes; Configuration Registers: Yes; 5V Tolerant I/O: Yes; Push-Pull I/O Type: Yes; Open Drain I/O Type: Yes; MountType: SMT; PartNumber: PCA9557PWR; Code_JEDEC: MO-153; ComponentLink1Description: Datasheet; ComponentLink1URL: http://www.ti.com/general/docs/lit/getliterature.tsp?genericPartNumber=PCA9557&fileType=pdf; ComponentLink2Description: URL Link1; ComponentLink2URL: SamplesURL:http://www.ti.com/product/pca9557#samples; Alternate Manufacturer: Texas Instruments
footprint PW0016A_N (TSOP, 16-Leads, Body 5x4.4mm, Pitch 0.65mm, IPC Medium Density)
footprint PW0016A_L (TSOP, 16-Leads, Body 5x4.4mm, Pitch 0.65mm, IPC High Density)
footprint PW0016A_M (TSOP, 16-Leads, Body 5x4.4mm, Pitch 0.65mm, IPC Low Density)
pins: 1 SCL (in) "Serial clock bus. Connect to VCC through a pullup resistor.", 2 SDA (io) "Serial data bus. Connect to VCC through a pullup resistor.", 3 A0 (in) "Address input. Connect directly to VCC or ground.", 4 A1 (in) "Address input. Connect directly to VCC or ground.", 5 A2 (in) "Address input. Connect directly to VCC or ground.", 6 P0 (io) ""P-port input/output. High impedance open-drain design structure. Connect to VCC through a pullup resistor.", 7 P1 (io) "P-port input/output. Push-pull design structure.", 8 GND (power) "Ground", 9 P2 (io) "P-port input/output. Push-pull design structure.", 10 P3 (io) "P-port input/output. Push-pull design structure.", 11 P4 (io) "P-port input/output. Push-pull design structure.", 12 P5 (io) "P-port input/output. Push-pull design structure.", 13 P6 (io) "P-port input/output. Push-pull design structure.", 14 P7 (io) "P-port input/output. Push-pull design structure.", 15 ~{RESET} (in) "Active-low reset input. Connect to VCC  through a pullup resistor, if no active connection is used.", 16 VCC (power) "Supply voltage"

## PEC02SAAN
designator JP?  (value not drawn)
Header, 100mil, 2x1, Tin, TH; Manufacturer: Sullins Connector Solutions; SymbolCreator: a0412235; U/M: EA; SymbolVersion: 2013-10-31; PartNumber: PEC02SAAN; ClassName: Header; PackageReference: Header, 2 PIN, 100mil, Tin; CompType: Header; RoHS: Y; MountType: TH; ComponentLink1Description: Datasheet Link; ComponentLink1URL: http://www.sullinscorp.com/catalogs/97_Page78-79_HEADER_.100_2.54mm_MALE_BREAKAWAY.pdf; Publisher: Texas Instruments; LatestRevisionDate: 2014-11-19; Supplier 1: Digi-Key; Supplier Part Number 1: S1012E-02-ND
footprint CONN_PEC02SAAN
pins: 1, 2
1 alternate drawing of the same symbol

## PEC03SAAN
designator JP?  (value not drawn)
Header, 100mil, 3x1, Tin, TH; Manufacturer: Sullins Connector Solutions; SymbolCreator: a0799628; U/M: EA; SymbolVersion: 2013-03-28; PartNumber: PEC03SAAN; PackageReference: Header, 3 PIN, 100mil, Tin; ClassName: Header; CompType: Header; RoHS: Y; MountType: TH; ComponentLink1Description: Datasheet Link; ComponentLink1URL: http://www.sullinscorp.com/catalogs/97_Page78-79_HEADER_.100_2.54mm_MALE_BREAKAWAY.pdf; Publisher: Texas Instruments; LatestRevisionDate: 2015-07-02; Supplier 1: Digi-Key; Supplier Part Number 1: S1012E-03-ND
footprint CONN_PEC03SAAN
pins: 1, 2, 3
3 alternate drawings of the same symbol

## Q4470-CLB
designator T?, comment Transformer, 400 uH, SMT
PartNumber: Q4470-CLB; Manufacturer: Coilcraft; SymbolCreator: Altium; DCR_Ohm: 0.95; Value: 400 uH; U/M: EA; SymbolVersion: 2015-08-10; CompType: Transformer; PackageReference: 6.6x6.99mm; MountType: SMT; RoHS: Y; ComponentLink1Description: Datasheet Link; ComponentLink1URL: http://www.coilcraft.com/pdfs/mintrans.pdf; Publisher: Texas Instruments; LatestRevisionDate: 2015-08-11
footprint Coilcraft_Q4470-CL (SMD, 6-Leads, Body 6.6x6.99mm, Pitch 2.54mm)
pins: 1, 2, 3, 4, 5, 6

## RC0603FR-072RL
designator R?  ValueDisplayed: 2.00  (hidden comment: RC0603FR-072RL)
RES, 2.00, 1%, 0.1 W, 0603; Manufacturer: Yageo America; CompType: Resistor; Value: 2.00; Res_ohm: 2; Value_Code: 2R00; Tolerance_%: 1; Power_W: 0.1; Value2: 0.1W; VDC_V: 150; TempCo: 200 ppm/C; EIA_Code: E96; U/M: EA; SymbolVersion: 2009-05-29; PartNumber: RC0603FR-072RL; PackageReference: 0603; RoHS: Y; Value1: 1%; MountType: SMT; Technology: Thick Film; Published: 2008-06-26; Publisher: Texas Instruments; LatestRevisionDate: 2015-06-13; ComponentLink1Description: Datasheet link; ComponentLink1URL: http://www.yageo.com/pdf/Pu-RC0603_51_PbFree_L_2.pdf; Supplier 1: Digi-Key; Supplier Part Number 1: 311-2.00HRCT-ND; Supplier 2: Mouser; Supplier Part Number 2: 603-RC0603FR-072RL; Supplier 3: Farnell; Supplier Part Number 3: 1872498
signal-integrity model Resistor
simulation model Resistor
footprint 0603
footprint 0603M
footprint 0603L
footprint 0603_HV
footprint 0603S
pins: 1, 2

## RC0603FR-07169KL
designator R?  ValueDisplayed: 169k  (hidden comment: RC0603FR-07169KL)
RES, 169 k, 1%, 0.1 W, 0603; Manufacturer: Yageo America; CompType: Resistor; Value: 169k; Res_ohm: 169000; Tolerance_%: 1; Power_W: 0.1; Value2: 0.1W; VDC_V: 150; TempCo: 200 ppm/C; EIA_Code: E96; U/M: EA; SymbolVersion: 2009-05-29; PartNumber: RC0603FR-07169KL; PackageReference: 0603; RoHS: Y; Value_Code: 169k; Value1: 1%; MountType: SMT; Technology: Thick Film; Published: 2008-06-26; Publisher: Texas Instruments; LatestRevisionDate: 2015-06-13; ComponentLink1Description: Datasheet link; ComponentLink1URL: http://www.yageo.com/pdf/Pu-RC0603_51_PbFree_L_2.pdf; Supplier 1: Digi-Key; Supplier Part Number 1: 311-169KHRCT-ND; Supplier 2: Mouser; Supplier Part Number 2: 603-RC0603FR-07169KL
signal-integrity model Resistor
simulation model Resistor
footprint 0603
footprint 0603M
footprint 0603L
footprint 0603_HV
footprint 0603S
pins: 1, 2

## RC0603FR-07523KL
designator R?  ValueDisplayed: 523k  (hidden comment: RC0603FR-07523KL)
RES, 523 k, 1%, 0.1 W, 0603; Manufacturer: Yageo America; CompType: Resistor; Value: 523k; Res_ohm: 523000; Tolerance_%: 1; Power_W: 0.1; Value2: 0.1W; VDC_V: 150; TempCo: 200 ppm/C; EIA_Code: E96; U/M: EA; SymbolVersion: 2009-05-29; PartNumber: RC0603FR-07523KL; PackageReference: 0603; RoHS: Y; Value_Code: 523k; Value1: 1%; MountType: SMT; Technology: Thick Film; Published: 2008-06-26; Publisher: Texas Instruments; LatestRevisionDate: 2015-06-13; ComponentLink1Description: Datasheet link; ComponentLink1URL: http://www.yageo.com/pdf/Pu-RC0603_51_PbFree_L_2.pdf; Supplier 1: Digi-Key; Supplier Part Number 1: 311-523KHRCT-ND; Supplier 2: Mouser; Supplier Part Number 2: 603-RC0603FR-07523KL
signal-integrity model Resistor
simulation model Resistor
footprint 0603
footprint 0603M
footprint 0603L
footprint 0603_HV
footprint 0603S
pins: 1, 2

## RG1608P-102-B-T5
designator R?  ValueDisplayed: 1.00k  (hidden comment: RG1608P-102-B-T5)
RES, 1.00 k, 0.1%, 0.1 W, 0603; Manufacturer: Susumu Co Ltd; CompType: Resistor; Value: 1.00k; Res_ohm: 1000; Value_Code: 1k00; Tolerance_%: 0.1; Value2: 0.1W; VDC_V: 75; TempCo: 25 ppm/C; EIA_Code: E192; U/M: EA; SymbolVersion: 2009-05-29; PartNumber: RG1608P-102-B-T5; PackageReference: 0603; RoHS: Y; Value1: 0.1%; Power_W: 0.1; MountType: SMT; Technology: Metal Film; Published: 2008-06-26; Publisher: Texas Instruments; LatestRevisionDate: 2015-06-13; ComponentLink1Description: Datasheet link; ComponentLink1URL: http://www.susumu.co.jp/english/pdf/products-j01-01.pdf; Supplier 1: Digi-Key; Supplier Part Number 1: RG16P1.0KBCT-ND; Supplier 2: Mouser; Supplier Part Number 2: 754-RG1608P-102-B-T5; Supplier 3: Farnell; Supplier Part Number 3: 1797076
signal-integrity model Resistor
simulation model Resistor
footprint 0603
footprint 0603M
footprint 0603L
footprint 0603_HV
footprint 0603S
pins: 1, 2

## SCUTlogo
designator *
footprint SCUTlogo
text: 华工logo

## SMAJ36CA
designator Z?  value 36V  (hidden comment: SMAJ36CA)
Diode, TVS, Bi, 36 V, 400 W, SMA; Manufacturer: Littelfuse; U/M: EA; Power_W: 400; Vr_V: 36; Value1: 400W; RJA_CperW: 120; CompType: TVS; SymbolVersion: 2012-01-13; PartNumber: SMAJ36CA; PackageReference: SMA; Vz_V: N/A; MountType: SMT; RoHS: Y; ComponentLink1Description: Datasheet link; ComponentLink1URL: http://www.littelfuse.com/~/media/electronics/datasheets/tvs_diodes/littelfuse_tvs_diode_smaj_datasheet.pdf.pdf; Published: 2008-10-08; Publisher: Texas Instruments; LatestRevisionDate: 2015-07-08; LatestRevisionNote: Updated Supplier Data; Supplier 1: Digi-Key; Supplier Part Number 1: SMAJ36CALFDKR-ND; Supplier 2: Mouser; Supplier Part Number 2: 576-SMAJ36CA; Supplier 3: Farnell; Supplier Part Number 3: 1677588
footprint SMA (Molded Diode, 2-Leads, Body 4.3x2.6mm, IPC Medium Density, based on OnSemi component dimensions and land pattern)
pins: 1, 2

## TPS76901DBV
designator U?
Ultralow-Power 100-mA Low-Dropout Linear Regulators, DBV0005A; Manufacturer: Texas Instruments; SymbolCreator: a0411947; CompType: IC; U/M: EA; SymbolVersion: 2013-10-18; PartNumber: TPS76901DBV; PackageReference: DBV0005A; MountType: SMT; ComponentLink1Description: Datasheet Link; ComponentLink1URL: http://www.ti.com/lit/ds/symlink/tps76901.pdf; RoHS: Y; Publisher: Texas Instruments; LatestRevisionDate: 2015-07-05; Alternate Manufacturer: Texas Instruments
footprint DBV0005A_N
footprint DBV0005A_M
footprint DBV0005A_L
pins: 1 IN (power), 2 GND (power), 3 ~{EN} (in), 4 FB (in), 5 OUT (power)